# Altium footprint library FTP.PcbLib: 207 footprints (part 3 of 13)
Each footprint in its own frame and in the unit in brackets; x right, y up, seen from the top. Pads: shape width x height; smd on the part's side, far side on the other; paste and mask are expansions set on the pad; w line width, h text height; cw(c..) or ccw(c..) is an arc to the next point about the centre after c.
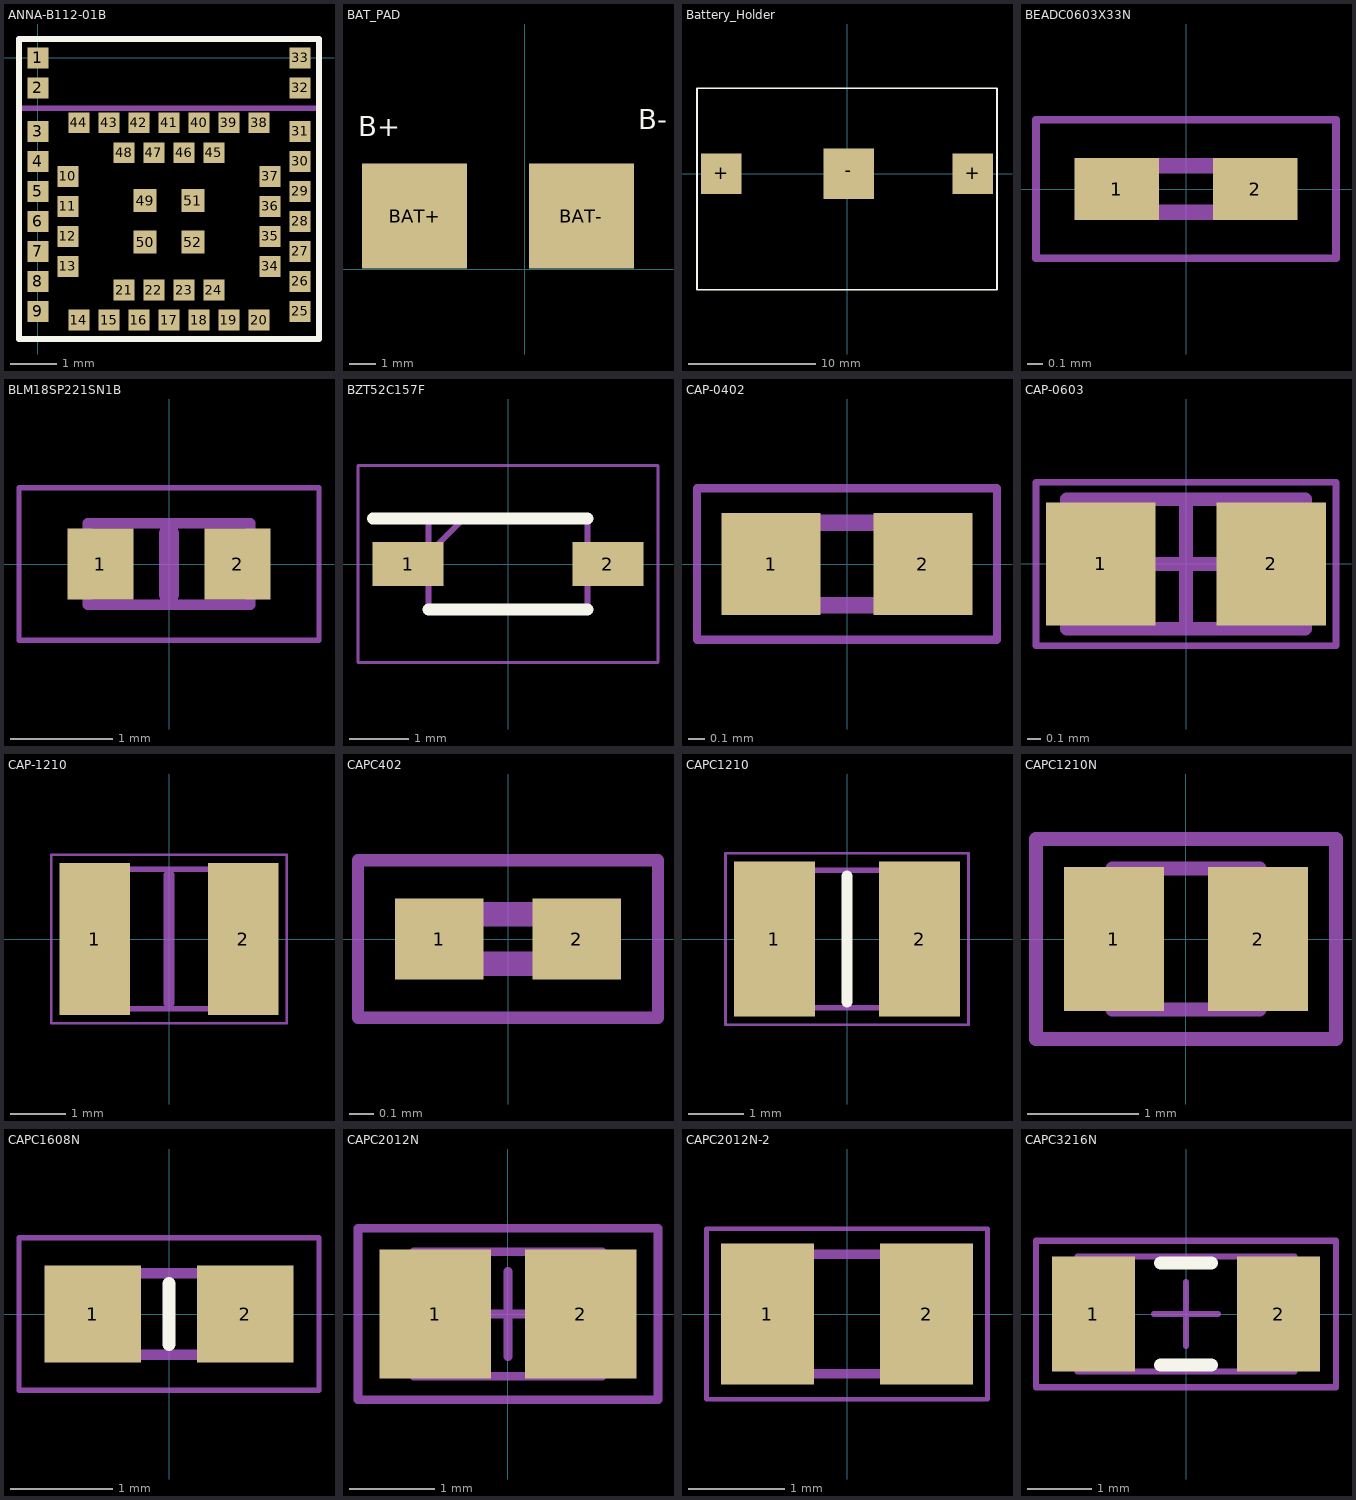
[diagram p2: the footprints below, top view; thin cyan lines are the x and y axes]

## ANNA-B112-01B [mm]
pads (52):
  rect 0.45x0.45 smd: 1(0,0) 2(0,-0.65) 3(0,-1.592) 4(0,-2.242) 5(0,-2.892) 6(0,-3.542) 7(0,-4.192) 8(0,-4.842) 9(0,-5.492) 10(0.65,-2.567) 11(0.65,-3.217) 12(0.65,-3.867) 13(0.65,-4.517) 14(0.89,-5.68) 15(1.54,-5.68) 16(2.19,-5.68) 17(2.84,-5.68) 18(3.49,-5.68) 19(4.14,-5.68) 20(4.79,-5.68) 21(1.865,-5.03) 22(2.515,-5.03) 23(3.165,-5.03) 24(3.815,-5.03) 25(5.68,-5.492) 26(5.68,-4.842) 27(5.68,-4.192) 28(5.68,-3.542) 29(5.68,-2.892) 30(5.68,-2.242) 31(5.68,-1.592) 32(5.68,-0.65) 33(5.68,0) 34(5.03,-4.517) 35(5.03,-3.867) 36(5.03,-3.217) 37(5.03,-2.567) 38(4.79,-1.405) 39(4.14,-1.405) 40(3.49,-1.405) 41(2.84,-1.405) 42(2.19,-1.405) 43(1.54,-1.405) 44(0.89,-1.405) 45(3.815,-2.055) 46(3.165,-2.055) 47(2.515,-2.055) 48(1.865,-2.055)
  rect 0.5x0.5 smd: 49(2.32,-3.092) 50(2.32,-3.992) 51(3.36,-3.092) 52(3.36,-3.992)
Top Overlay:
  lines w0.127: -0.41,-6.09 6.09,-6.09 6.09,0.41 -0.41,0.41 -0.41,-6.09
Mechanical 15:
  lines w0.127: -0.41,-6.09 -0.41,-1.09 ; -0.41,-6.09 -0.41,-1.09 ; -0.41,-6.09 6.09,-6.09 ; -0.41,-6.09 6.09,-6.09 ; -0.41,-1.09 -0.41,0.41 ; -0.41,-1.09 -0.41,0.41 ; -0.41,-1.09 6.09,-1.09 ; -0.41,-1.09 6.09,-1.09 ; -0.41,0.41 6.09,0.41 ; -0.41,0.41 6.09,0.41 ; 6.09,-6.09 6.09,-1.09 ; 6.09,-6.09 6.09,-1.09 ; 6.09,-1.09 6.09,0.41 ; 6.09,-1.09 6.09,0.41
3D body "ANNA-B112--3DModel-STEP-56544.STEP": height 1.25, standoff 0, extent -0.41,-6.142 6.09,0.358

## BAT_PAD [mm]
pads (2):
  rect 4x4 smd mask+0.05: BAT+(-4.191,2.032) BAT-(2.159,2.032)
Top Overlay:
  text "B-" at 4.318,5.334 h0.76
  text "B+" at -6.35,5.08 h0.76

## Battery_Holder [mm]
pads (3):
  rect 3.18x3.18 smd: +(-9.906,0) +(9.906,0)
  rect 3.96x3.96 smd: -(0.127,0)
Top Overlay:
  lines w0.125: -11.811,6.731 11.811,6.731
  lines w0.127: -11.811,6.731 -11.811,2.413 -11.811,-4.445 -11.811,-9.144 -10.414,-9.144 11.811,-9.144 11.811,6.731
3D body "User Library-001085 cr-1632 batt.STEP": height -0.6, standoff -3.8, extent -7.873,-8.761 8.127,7.239
3D body "keystone-PN3092.STEP": height 3.95, standoff -0.01, extent -11.354,-8.763 11.354,6.325

## BEADC0603X33N [mm]
pads (2):
  rect 0.55x0.4 smd: 1(-0.45,0) 2(0.45,0)
Mechanical 15:
  lines w0.1: -0.3,-0.15 -0.3,0.15 0.3,0.15 0.3,-0.15 -0.3,-0.15
Mechanical 20:
  lines w0.05: -0.975,-0.45 -0.975,0.45 0.975,0.45 0.975,-0.45 -0.975,-0.45
3D body "MAF0603FAL330BT000.stp": height 0.33, standoff 0, extent -0.3,-0.15 0.3,0.15

## BLM18SP221SN1B [mm]
pads (2):
  rect 0.65x0.7 smd: 1(-0.675,0) 2(0.675,0)
Assembly Bottom:
  lines w0.05: -1.475,-0.75 -1.475,0.75 1.475,0.75 1.475,-0.75 -1.475,-0.75
  lines w0.1: -0.8,-0.4 -0.8,0.4 0.8,0.4 0.8,-0.4 -0.8,-0.4
3D Body Bottom:
  lines w0.2: 0,-0.3 0,0.3
3D body "BLM18PG121SN1D.stp": height 0.81, standoff 0.01, extent -0.8,-0.381 0.8,0.419

## BZT52C157F [mm]
pads (2):
  rect 1.2x0.75 smd: 1(-1.7,0) 2(1.7,0)
Top Overlay:
  lines w0.2: -2.3,0.775 1.35,0.775 ; -1.35,-0.775 1.35,-0.775
Mechanical 15:
  lines w0.1: -1.35,0.175 -0.75,0.775 ; -1.35,-0.775 1.35,-0.775 1.35,0.775 -1.35,0.775 -1.35,-0.775
Mechanical 20:
  lines w0.05: -2.55,-1.675 2.55,-1.675 2.55,1.675 -2.55,1.675 -2.55,-1.675
3D body "BZT52C15-7-F.stp": height 1.45, standoff 0, extent -1.977,-0.735 1.723,0.815

## CAP-0402 [mm]
pads (2):
  rect 0.6x0.62 smd: 1(-0.46,0) 2(0.46,0)
Bottom Assembly:
  lines w0.05: -0.91,-0.46 -0.91,0.46 0.91,0.46 0.91,-0.46 -0.91,-0.46
  lines w0.1: -0.5,-0.25 -0.5,0.25 0.5,0.25 0.5,-0.25 -0.5,-0.25

## CAP-0603 [mm]
height 0.9
pads (2):
  rect 0.8x0.9 smd: 1(-0.625,0) 2(0.625,0)
Mechanical 13:
  lines w0.1: -0.875,-0.475 -0.875,0.475 0.875,0.475 0.875,-0.475 -0.875,-0.475
Mechanical 15:
  lines w0.05: -1.1,-0.6 -1.1,0.6 1.1,0.6 1.1,-0.6 -1.1,-0.6
  lines w0.1: -0.475,0 0.475,0 ; 0,-0.475 0,0.475
3D body: height 0.9, standoff 0, extent -0.525,-0.475 0.525,0.475
3D body: height 0.9, standoff 0, extent -0.875,-0.475 -0.525,0.475
3D body: height 0.9, standoff 0, extent 0.525,-0.475 0.875,0.475

## CAP-1210 [mm]
pads (2):
  rect 1.26x2.72 smd: 1(-1.33,0) 2(1.33,0)
3D Body Bottom:
  lines w0.2: 0,-1.15 0,1.15
Bottom Assembly:
  lines w0.05: -2.11,-1.51 -2.11,1.51 2.11,1.51 2.11,-1.51 -2.11,-1.51
  lines w0.1: -1.6,-1.25 -1.6,1.25 1.6,1.25 1.6,-1.25 -1.6,-1.25
3D body "CAP1210.STEP": height 1.5, standoff 0, extent -1.749,-1.3 1.651,1.3

## CAPC402 [mm]
pads (2):
  rect 0.36x0.33 smd: 1(-0.28,0) 2(0.28,0)
Mechanical 15:
  lines w0.1: -0.2,-0.1 0.2,-0.1 0.2,0.1 -0.2,0.1 -0.2,-0.1
Mechanical 20:
  lines w0.05: -0.61,-0.32 0.61,-0.32 0.61,0.32 -0.61,0.32 -0.61,-0.32
3D body "CL02C330JO2NNNC.stp": height 0.22, standoff 0, extent -0.2,-0.1 0.2,0.1

## CAPC1210 [mm]
pads (2):
  rect 1.48x2.82 smd: 1(-1.32,0) 2(1.32,0)
Top Overlay:
  lines w0.2: 0,-1.15 0,1.15
Mechanical 15:
  lines w0.1: -1.65,-1.25 1.65,-1.25 1.65,1.25 -1.65,1.25 -1.65,-1.25
Mechanical 20:
  lines w0.05: -2.21,-1.56 2.21,-1.56 2.21,1.56 -2.21,1.56 -2.21,-1.56
3D body "KGM32LCG3A103JU.stp": height 2.8, standoff 0, extent -1.65,-1.25 1.65,1.25

## CAPC1210N [mm] "Chip Capacitor, Body 1.2x1.0mm, IPC Medium Density"
height 1.02
pads (2):
  rect 0.9x1.3 smd: 1(-0.65,0) 2(0.65,0)
Mechanical 13:
  lines w0.127: -0.66,-0.635 0.66,-0.635 0.66,0.635 -0.66,0.635 -0.66,-0.635
Mechanical 15:
  lines w0.127: -1.35,-0.9 1.35,-0.9 1.35,0.9 -1.35,0.9 -1.35,-0.9
  text "+" at -0.495,-0.76 h1.5
3D body: height 1.02, standoff 0, extent -0.66,-0.635 0.66,0.635

## CAPC1608N [mm]
pads (2):
  rrect0% 0.95x0.95 smd: 1(-0.75,0) 2(0.75,0)
Top Overlay:
  lines w0.127: 0,-0.3 0,0.3
Mechanical 15:
  lines w0.05: -1.475,-0.75 -1.475,0.75 1.475,0.75 1.475,-0.75 -1.475,-0.75
  lines w0.1: -0.8,-0.4 0.8,-0.4 0.8,0.4 -0.8,0.4 -0.8,-0.4
3D body "UMK107BJ105KA-T.stp": height 0.81, standoff 0.01, extent -0.85,-0.45 0.75,0.45

## CAPC2012N [mm] "Chip Capacitor, Body 2.0x1.3mm, IPC Medium Density"
height 1.1
pads (2):
  rect 1.3x1.5 smd: 1(-0.85,0) 2(0.85,0)
Mechanical 13:
  lines w0.1: -1.1,-0.725 -1.1,0.725 1.1,0.725 1.1,-0.725 -1.1,-0.725
Mechanical 15:
  lines w0.1: -0.5,0 0.5,0 ; 0,-0.5 0,0.5 ; -1.75,-1 -1.75,1 1.75,1 1.75,-1 -1.75,-1
3D body: height 1.1, standoff 0, extent -1.1,-0.725 1.1,0.725

## CAPC2012N-2 [mm]
pads (2):
  rect 0.97x1.47 smd: 1(-0.83,0) 2(0.83,0)
Mechanical 15:
  lines w0.05: -1.465,-0.89 -1.465,0.89 1.465,0.89 1.465,-0.89 -1.465,-0.89
  lines w0.1: -1,-0.625 -1,0.625 1,0.625 1,-0.625 -1,-0.625
3D body "GRM21BZ71H475KE15K.stp": height 1.18, standoff -0.07, extent -1.127,-0.762 0.873,0.688

## CAPC3216N [mm] "Chip Capacitor, Body 3.2x1.6mm, IPC Medium Density"
height 1.35
pads (2):
  rect 1.3x1.8 smd: 1(-1.45,0) 2(1.45,0)
Top Overlay:
  lines w0.2: -0.4,-0.8 0.4,-0.8 ; -0.4,0.8 0.4,0.8
Mechanical 13:
  lines w0.1: -1.7,-0.9 -1.7,0.9 1.7,0.9 1.7,-0.9 -1.7,-0.9
Mechanical 15:
  lines w0.1: -0.5,0 0.5,0 ; 0,-0.5 0,0.5 ; -2.35,-1.15 -2.35,1.15 2.35,1.15 2.35,-1.15 -2.35,-1.15
3D body: height 1.35, standoff 0, extent -1.7,-0.9 1.7,0.9